# Altium schematic symbol library UCP.SchLib: 378 symbols (part 8 of 14)
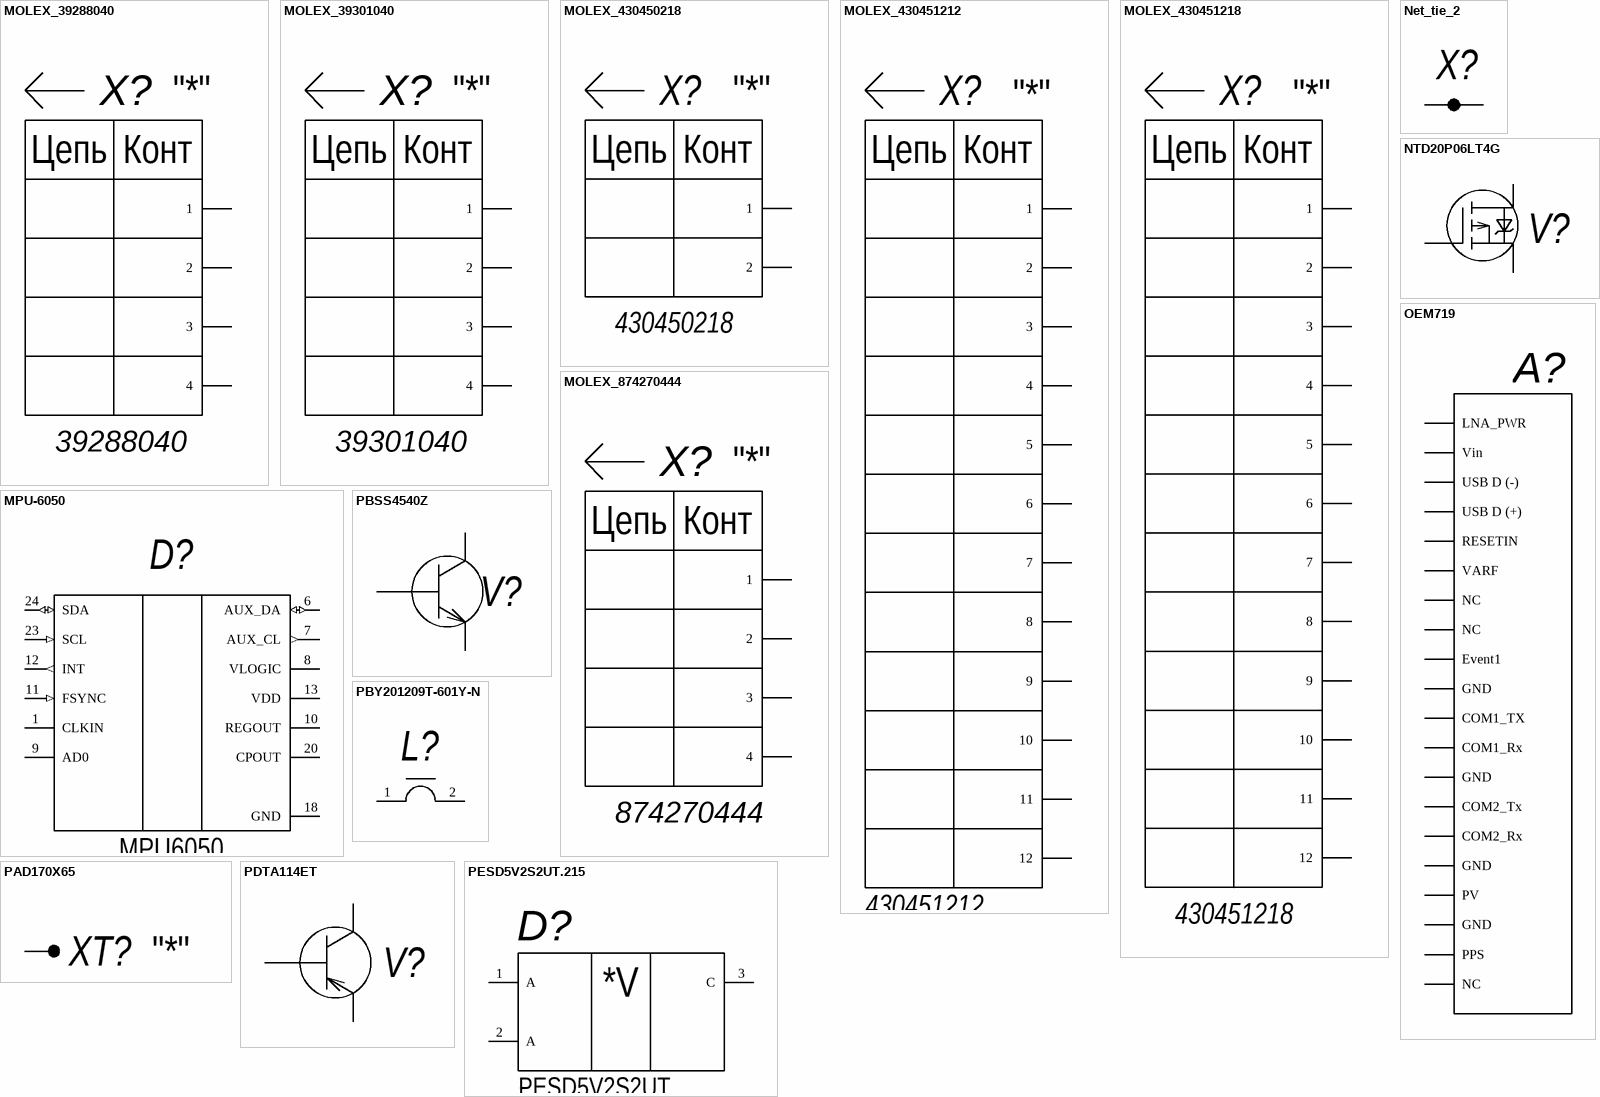
[diagram p31: symbols MOLEX_39288040 to PESD5V2S2UT.215]

## MOLEX_430451212
designator X?, comment 430451212  Marck-2: "*"
Connector Wire to Board Header 12 Position 3mm Solder Straight Thru-Hole Tray; Manufacturer 1: Molex; Manufacturer Part Number 1: 43045-1212; Marck-1: *; ComponentLink1URL: https://datasheet.ciiva.com/712/430451218-sd-712339.pdf?src-supplier=Digi-Key; ComponentLink1Description: https://datasheet.ciiva.com/712/430451218-sd-712339.pdf?src-supplier=Digi-Key; ComponentLink2URL: https://datasheet.ciiva.com/23602/1772133-23602362.pdf?src-supplier=Newark; ComponentLink2Description: https://datasheet.ciiva.com/23602/1772133-23602362.pdf?src-supplier=Newark; ComponentLink3URL: https://datasheet.ciiva.com/5154/0430451218-pcb-headers-142841-5154459.pdf?src-supplier=Mouser; ComponentLink3Description: https://datasheet.ciiva.com/5154/0430451218-pcb-headers-142841-5154459.pdf?src-supplier=Mouser; ComponentLink4URL: https://datasheet.ciiva.com/11748/0900766b80d6135b-11748082.pdf?src-supplier=RSComponents; ComponentLink4Description: https://datasheet.ciiva.com/11748/0900766b80d6135b-11748082.pdf?src-supplier=RSComponents; ComponentLink5URL: https://datasheet.ciiva.com/30073/1700430451218-pcb-headers-30073544.pdf?src-supplier=Onlinecomponents.com; ComponentLink5Description: https://datasheet.ciiva.com/30073/1700430451218-pcb-headers-30073544.pdf?src-supplier=Onlinecomponents.com; ComponentLink6URL: https://datasheet.ciiva.com/22637/1855212-22637515.pdf?src-supplier=Element14; ComponentLink6Description: https://datasheet.ciiva.com/22637/1855212-22637515.pdf?src-supplier=Element14; ComponentLink7URL: https://datasheet.ciiva.com/14155/04402320-14155180.pdf?src-supplier=Distrelec; ComponentLink7Description: https://datasheet.ciiva.com/14155/04402320-14155180.pdf?src-supplier=Distrelec; ComponentLink8URL: https://datasheet.ciiva.com/8004/1855212-8004159.pdf?src-supplier=Element14; ComponentLink8Description: https://datasheet.ciiva.com/8004/1855212-8004159.pdf?src-supplier=Element14; Case/Package: DIP-18 (+MECH-2); Type: Вилка; Value: 430451212; Supplier 1: Rs; Supplier Part Number 1: 2332927P; RoHS 1: Yes; Category: Headers and Wire Housings; Stock 1: 4410; Pricing 1: 5=541,25700, 100=415,45000, 375=369,65200, 1500=286,37100 (RUB); ComponentLink9URL: https://datasheet.ciiva.com/27050/883747-27050606.pdf?src-supplier=Jameco; ComponentLink9Description: https://datasheet.ciiva.com/27050/883747-27050606.pdf?src-supplier=Jameco; ComponentLink10URL: https://datasheet.ciiva.com/5148/0430451212-pcb-headers-168208-5148743.pdf?src-supplier=Mouser; ComponentLink10Description: https://datasheet.ciiva.com/5148/0430451212-pcb-headers-168208-5148743.pdf?src-supplier=Mouser; ComponentLink11URL: https://datasheet.ciiva.com/30238/390430451212-pcb-headers-30238066.pdf?src-supplier=Onlinecomponents.com; ComponentLink11Description: https://datasheet.ciiva.com/30238/390430451212-pcb-headers-30238066.pdf?src-supplier=Onlinecomponents.com; ComponentLink12URL: https://datasheet.ciiva.com/11747/0900766b801ddde5-11747979.pdf?src-supplier=Rs; ComponentLink12Description: https://datasheet.ciiva.com/11747/0900766b801ddde5-11747979.pdf?src-supplier=Rs; ComponentLink13URL: https://datasheet.ciiva.com/18454/70090800-18454534.pdf?src-supplier=Allied+Electronics; ComponentLink13Description: https://datasheet.ciiva.com/18454/70090800-18454534.pdf?src-supplier=Allied+Electronics; ComponentLink14URL: https://datasheet.ciiva.com/14155/04402316-14155196.pdf?src-supplier=Distrelec; ComponentLink14Description: https://datasheet.ciiva.com/14155/04402316-14155196.pdf?src-supplier=Distrelec; ComponentLink15URL: https://datasheet.ciiva.com/10084/0430451212-pcb-headers-10084092.pdf?src-supplier=Avnet; ComponentLink15Description: https://datasheet.ciiva.com/10084/0430451212-pcb-headers-10084092.pdf?src-supplier=Avnet; ComponentLink16URL: https://datasheet.ciiva.com/1443/1772031-1443556.pdf?src-supplier=Element14; ComponentLink16Description: https://datasheet.ciiva.com/1443/1772031-1443556.pdf?src-supplier=Element14
footprint MOLEX_430451212
pins: 1, 2, 3, 4, 5, 6, 7, 8, 9, 10, 11, 12
text: Цепь; Конт

## MOLEX_430451218
designator X?, comment 430451218  Marck-2: "*"
Header, 2 Row, Vertical, Solder Tab, 12 Pin, Tin Plate, SMT/Glow Wire Compatible; Manufacturer 1: Molex; Manufacturer Part Number 1: 43045-1218; Number of Contacts: 12; Contact Resistance: 10mR; Gender: Male; Max Voltage Rating (DC): 250.25kV; Connector Type: Rectangular; Current Rating: 5A; Voltage Rating: 600V; Voltage Rating (AC): 250V; Insulation Resistance: 1GR; Mating Cycles: 30; Pitch: 3mm; Row Spacing: 0.118inch; Glow Wire Compliant: Compliant; Value: 430450212; Marck-1: *; Supplier 1: Digi-Key; Supplier Part Number 1: 23-0430451218CT-ND; RoHS: Yes; Category: Headers and Wire Housings; Stock 1: 10398; Pricing 1: 1=4,04000, 10=3,55700, 100=2,82980 (USD); Mount: SMT; Contact Plating: Tin; Contact Material: Brass,Tin,CuZn; Housing Color: Black; Housing Material: Thermoplastic; Color: Black; Material: Polymer,Glass; Min Operating Temperature: -40°C; Max Operating Temperature: 105°C; Termination: Solder; Number of Rows: 2; Packaging: Tape and Reel; Orientation: Vertical; Package Quantity: 10; Contact Gender: Male; Number of Positions: 12; Series: Micro-Fit 3.0™ 43045; Contact Type: Male Pin; Number of Poles: 12; Number of Circuits: 12; Working Voltage: 250V; Fastening Type: Ramp; Voltage Rating (DC): 250V; Diameter: 3mm; Radiation Hardening: No; RoHS Compliant: Yes; Lead Free: Contains Lead; REACH SVHC: Unknown; Halogen Free: Low Halogen; Flammability Rating: UL94 V-0; ComponentLink1URL: https://datasheet.ciiva.com/712/430451218-sd-712339.pdf?src-supplier=Digi-Key; ComponentLink1Description: https://datasheet.ciiva.com/712/430451218-sd-712339.pdf?src-supplier=Digi-Key; ComponentLink2URL: https://datasheet.ciiva.com/23602/1772133-23602362.pdf?src-supplier=Newark; ComponentLink2Description: https://datasheet.ciiva.com/23602/1772133-23602362.pdf?src-supplier=Newark; ComponentLink3URL: https://datasheet.ciiva.com/5154/0430451218-pcb-headers-142841-5154459.pdf?src-supplier=Mouser; ComponentLink3Description: https://datasheet.ciiva.com/5154/0430451218-pcb-headers-142841-5154459.pdf?src-supplier=Mouser; ComponentLink4URL: https://datasheet.ciiva.com/11748/0900766b80d6135b-11748082.pdf?src-supplier=RSComponents; ComponentLink4Description: https://datasheet.ciiva.com/11748/0900766b80d6135b-11748082.pdf?src-supplier=RSComponents; ComponentLink5URL: https://datasheet.ciiva.com/30073/1700430451218-pcb-headers-30073544.pdf?src-supplier=Onlinecomponents.com; ComponentLink5Description: https://datasheet.ciiva.com/30073/1700430451218-pcb-headers-30073544.pdf?src-supplier=Onlinecomponents.com; ComponentLink6URL: https://datasheet.ciiva.com/22637/1855212-22637515.pdf?src-supplier=Element14; ComponentLink6Description: https://datasheet.ciiva.com/22637/1855212-22637515.pdf?src-supplier=Element14; ComponentLink7URL: https://datasheet.ciiva.com/14155/04402320-14155180.pdf?src-supplier=Distrelec; ComponentLink7Description: https://datasheet.ciiva.com/14155/04402320-14155180.pdf?src-supplier=Distrelec; ComponentLink8URL: https://datasheet.ciiva.com/8004/1855212-8004159.pdf?src-supplier=Element14; ComponentLink8Description: https://datasheet.ciiva.com/8004/1855212-8004159.pdf?src-supplier=Element14; Case/Package: SMD-14; Type: Вилка
footprint MOLEX_430451218
pins: 1, 2, 3, 4, 5, 6, 7, 8, 9, 10, 11, 12
text: Цепь; Конт

## MOLEX_874270444
designator X?, comment 874270444  Marck-2: "*"
Conn Power HDR 4 POS 4.2mm Solder ST Thru-Hole 4 Terminal 1 Port Mini-Fit JráTray; Manufacturer 1: Molex; Manufacturer Part Number 1: 87427-0444; Marck-1: *; ComponentLink1URL: https://datasheet.ciiva.com/7843/1596928-7843938.pdf?src-supplier=Element14; ComponentLink1Description: https://datasheet.ciiva.com/7843/1596928-7843938.pdf?src-supplier=Element14; ComponentLink2URL: https://datasheet.ciiva.com/22683/1722365-22683427.pdf?src-supplier=Element14; ComponentLink2Description: https://datasheet.ciiva.com/22683/1722365-22683427.pdf?src-supplier=Element14; ComponentLink3URL: https://datasheet.ciiva.com/30131/73420039288040-pcb-headers-30131996.pdf?src-supplier=Onlinecomponents.com; ComponentLink3Description: https://datasheet.ciiva.com/30131/73420039288040-pcb-headers-30131996.pdf?src-supplier=Onlinecomponents.com; ComponentLink4URL: https://datasheet.ciiva.com/16654/0039288040-pcb-headers-16654999.pdf?src-supplier=Avnet+Europe; ComponentLink4Description: https://datasheet.ciiva.com/16654/0039288040-pcb-headers-16654999.pdf?src-supplier=Avnet+Europe; ComponentLink5URL: https://datasheet.ciiva.com/5147/0039288040-pcb-headers-228424-5147723.pdf?src-supplier=Mouser; ComponentLink5Description: https://datasheet.ciiva.com/5147/0039288040-pcb-headers-228424-5147723.pdf?src-supplier=Mouser; ComponentLink6URL: https://datasheet.ciiva.com/11746/0900766b80d882e8-11746219.pdf?src-supplier=RSComponents; ComponentLink6Description: https://datasheet.ciiva.com/11746/0900766b80d882e8-11746219.pdf?src-supplier=RSComponents; ComponentLink7URL: https://datasheet.ciiva.com/19461/881346-19461679.pdf?src-supplier=Jameco; ComponentLink7Description: https://datasheet.ciiva.com/19461/881346-19461679.pdf?src-supplier=Jameco; ComponentLink8URL: https://datasheet.ciiva.com/26916/getdatasheetpartid-149656-26916395.pdf?src-supplier=Verical; ComponentLink8Description: https://datasheet.ciiva.com/26916/getdatasheetpartid-149656-26916395.pdf?src-supplier=Verical; Supplier 1: Farnell; Supplier Part Number 1: 2612452; RoHS 1: Yes; Category: Headers and Wire Housings; Stock 1: 316; Pricing 1: 1=0,65000, 10=0,54100, 50=0,48100, 100=0,42100, 500=0,37600, 1000=0,33100 (EUR); ComponentLink9URL: https://datasheet.ciiva.com/5148/0874270444-pcb-headers-262998-5148611.pdf?src-supplier=Mouser; ComponentLink9Description: https://datasheet.ciiva.com/5148/0874270444-pcb-headers-262998-5148611.pdf?src-supplier=Mouser; ComponentLink10URL: https://datasheet.ciiva.com/30087/0874270444-pcb-headers-30087364.pdf?src-supplier=Onlinecomponents.com; ComponentLink10Description: https://datasheet.ciiva.com/30087/0874270444-pcb-headers-30087364.pdf?src-supplier=Onlinecomponents.com; ComponentLink11URL: https://datasheet.ciiva.com/11753/0900766b80d5f08a-11753057.pdf?src-supplier=RSComponents; ComponentLink11Description: https://datasheet.ciiva.com/11753/0900766b80d5f08a-11753057.pdf?src-supplier=RSComponents; Value: 874270444; Case/Package: DIP-4; Mount: THT; Type: Вилка
footprint MOLEX_874270444 (Header, Vertical Receptacle, 4.20 mm row X 5.50 mm column pitch; 1.19 mm lead width, 4 pins, 2 rows, 2 pins per row, 9.80 mm L X 9.60 mm W X 13.05 mm H body)
pins: 1, 2, 3, 4
text: Цепь; Конт

## MPU-6050
designator D?  value MPU6050  (hidden comment: MPU-6050)
IMU ACCEL/GYRO 3-AXIS I2C 24QFN; Manufacturer 1: TDK InvenSense; Sensor Type: Accelerometer,Gyroscope,6 Axis; Type: Микросхема; Supplier 1: Farnell; Supplier Part Number 1: 1864742; Manufacturer Part Number 1: MPU-6050; RoHS 1: Yes; Category: Inertial Measurement Units (IMUs); Pricing 1: 1=11,33000, 10=9,28000, 25=8,04000, 50=7,45000 (EUR); Mount: SMT; Case/Package: QFN24; Min Operating Temperature: -40°C; Max Operating Temperature: 85°C; Packaging: Cut Tape; Output Type: I2C; Series: -; RoHS Compliant: Yes; ComponentLink1URL: https://datasheet.ciiva.com/1513/1788002-1513632.pdf?src-supplier=Element14; ComponentLink1Description: https://datasheet.ciiva.com/1513/1788002-1513632.pdf?src-supplier=Element14; ComponentLink2URL: https://datasheet.ciiva.com/22731/1788002-22731434.pdf?src-supplier=Element14; ComponentLink2Description: https://datasheet.ciiva.com/22731/1788002-22731434.pdf?src-supplier=Element14
footprint TDK_MPU6050 (Quad Flat No-Lead (QFN) with Thermal Tab, 0.50 mm pitch;  square, 6 pin X 6 pin, 4.00 mm L X 4.00 mm W X 0.95 mm H body)
pins: 1 CLKIN "Назначение вывода", 2 NC hidden "Назначение вывода", 3 NC hidden "Назначение вывода", 4 NC hidden "Назначение вывода", 5 NC hidden "Назначение вывода", 6 AUX_DA (io) "Назначение вывода", 7 AUX_CL (out) "Назначение вывода", 8 VLOGIC (power) "Назначение вывода", 9 AD0 "Назначение вывода", 10 REGOUT "Назначение вывода", 11 FSYNC (in) "Назначение вывода", 12 INT (out) "Назначение вывода", 13 VDD (power) "Назначение вывода", 14 NC hidden "Назначение вывода", 15 NC hidden "Назначение вывода", 16 NC hidden "Назначение вывода", 17 NC hidden "Назначение вывода", 18 GND (power) "Назначение вывода", 19 RESV hidden "Назначение вывода", 20 CPOUT "Назначение вывода", 21 RESV hidden "Назначение вывода", 22 RESV hidden "Назначение вывода", 23 SCL (in) "Назначение вывода", 24 SDA (io) "Назначение вывода"

## Net_tie_2
designator X?, comment Net_Tie  (value not drawn)  (net tie, no BOM)
Соединение цепей 2 контакта; Value: 0; Mount: 0; Type: 0
footprint Net_tie_2 (Connection 2 pin)
pins: 1 "Назначение вывода", 2 "Назначение вывода"

## NTD20P06LT4G
designator V?  (value not drawn)
MOSFET – Power, Single, / P-Channel, DPAK / -60 V, -15.5 A; Value: 20P06; Supplier Part Number 1: 47AC9536; Supplier 1: Newark; Case/Package: TO-252-3; Mount: SMT; Type: Транзистор
footprint DPAK4P229_990X238L159X76T520X546N (DPAK, 2.29 mm pitch; 2 pin, 6.095 mm L X 6.54 mm W X 2.38 mm H body)
pins: 1 G, 3 S, 4 D

## OEM719
designator A?  (value not drawn)
Case/Package: DIP-20; Mount: THT; Type: Модуль электронный; Value: OEM719
footprint OEM719
pins: 1 LNA_PWR "Назначение вывода", 2 Vin "Назначение вывода", 3 USB D (-) "Назначение вывода", 4 USB D (+) "Назначение вывода", 5 RESETIN "Назначение вывода", 6 VARF "Назначение вывода", 7 NC "Назначение вывода", 8 NC "Назначение вывода", 9 Event1 "Назначение вывода", 10 GND "Назначение вывода", 11 COM1_TX "Назначение вывода", 12 COM1_Rx "Назначение вывода", 13 GND "Назначение вывода", 14 COM2_Tx "Назначение вывода", 15 COM2_Rx "Назначение вывода", 16 GND "Назначение вывода", 17 PV "Назначение вывода", 18 GND "Назначение вывода", 19 PPS "Назначение вывода", 20 NC "Назначение вывода"

## PAD170X65
designator XT?  Marck-2: "*"  (no BOM)
Pad for mounting wire L=1.70 mm W=0.65 mm; Value: 0; Marck-1: *; Case/Package: SMT-1; Mount: SMT; Type: 0
footprint PAD170X65 (Pad for mounting wire L=1.70 mm W=0.65 mm)
pins: 1

## PBSS4540Z
designator V?, comment PBSS4540Z,115  (value not drawn)
40V, 5A low VCEsat NPN transistor; Manufacturer 1: Nexperia; Case/Package: SOT223; Mount: SMT; Type: Транзистор; Value: PBSS4540Z; Supplier 1: Farnell; Supplier Part Number 1: 8736383; Manufacturer Part Number 1: PBSS4540Z,115; RoHS 1: Yes; Category: BJTs; Stock 1: 3756; Pricing 1: 1=0,485, 10=0,403, 50=0,267, 200=0,24, 500=0,213 (EUR); RoHS Compliant: Yes; ComponentLink1URL: http://www.farnell.com/datasheets/723142.pdf?src-supplier=Farnell; ComponentLink1Description: http://www.farnell.com/datasheets/723142.pdf?src-supplier=Farnell
footprint SOT223-4P230_700X180L92X75N (Small Outline Transistor (SOT223), 2.30 mm pitch; 4 pin, 6.50 mm L X 3.50 mm W X 1.80 mm H body)
pins: 1 B, 2 C, 3 E, 4 C

## PBY201209T-601Y-N
designator L?  (value not drawn)
SMT EMI Suppression Ferrite Bead, size 0805, 600Ohm, 1.5A; Manufacturer Part Number: 742792041; Manufacturer: Wurth Elektronik; Impedance max.: 700Ohm; DC Resistance max.: 0.4Ohm; Type: Бусина ферритовая; Value: FB0805; ComponentLink1Description: Manufacturer; ComponentLink1URL: http://www.we-online.de; ComponentLink2Description: Datasheet; ComponentLink2URL: https://www.we-online.com/catalog/datasheet/742792041.pdf; Operating Temperature: -55 to +125degC; Packaging: Tape and Reel; Published Date: March 2020; Rated Current: 1.5A; Impedance @100MHz: 600Ohm; Mounting Technology: SMT; Size: 0805; Supplier 1: Digi-Key; Supplier 2: Digi-Key; Supplier 3: Digi-Key; Supplier Part Number 1: 732-1604-1-ND; Supplier Part Number 2: 732-1605-1-ND; Supplier Part Number 3: 732-1589-1-ND; Case/Package: 0805; Mount: SMT
footprint INDC200X125X60L35 (Inductor, Chip; 2.00 mm L X 1.25 mm W X 0.60 mm H body)
pins: 1 "Назначение вывода", 2 "Назначение вывода"

## PDTA114ET
designator V?, comment PDTA114ET,215  (value not drawn)
PNP resistor-equipped transistors. / R1 = 10k, R2 = 10k.; Supplier 1: Avnet; Supplier 2: Digi-Key; Supplier Part Number 2: 1727-5127-1-ND; Supplier Part Number 1: PDTA114ET215; Case/Package: SOT-23-3; Mount: SMT; Type: Транзистор; Value: PDTA114ET
footprint SOT23-3P95_240X110L25X60N (Small Outline Transistor (SOT23), 0.95 mm pitch; 3 pin, 2.90 mm L X 1.30 mm W X 1.10 mm H body)
footprint SOT23-3P95_240X110L30X43N (Small Outline Transistor (SOT23), 0.95 mm pitch; 3 pin, 2.90 mm L X 1.30 mm W X 1.10 mm H body)
pins: 1 B, 2 E, 3 C

## PESD5V2S2UT.215
designator D?  value PESD5V2S2UT  (hidden comment: PESD5V2S2UT.215)
Double ESD protection diodes in SOT23 package; Type: Микросхема; Case/Package: SOT-23-3; ComponentLink1URL: https://datasheet.ciiva.com/1180/48082-1180489.pdf?src-supplier=Element14; ComponentLink1Description: https://datasheet.ciiva.com/1180/48082-1180489.pdf?src-supplier=Element14; ComponentLink2URL: https://datasheet.ciiva.com/14174/qi600123-e-14174045.pdf?src-supplier=Distrelec; ComponentLink2Description: https://datasheet.ciiva.com/14174/qi600123-e-14174045.pdf?src-supplier=Distrelec; ComponentLink3URL: https://datasheet.ciiva.com/1180/23073-1180485.pdf?src-supplier=Element14; ComponentLink3Description: https://datasheet.ciiva.com/1180/23073-1180485.pdf?src-supplier=Element14; Mount: SMT; Supplier 1: Rs; Supplier Part Number 1: 1661429
footprint SOT23-3P95_240X110L30X43N (Small Outline Transistor (SOT23), 0.95 mm pitch; 3 pin, 2.90 mm L X 1.30 mm W X 1.10 mm H body)
pins: 1 A, 2 A, 3 C
text: *V

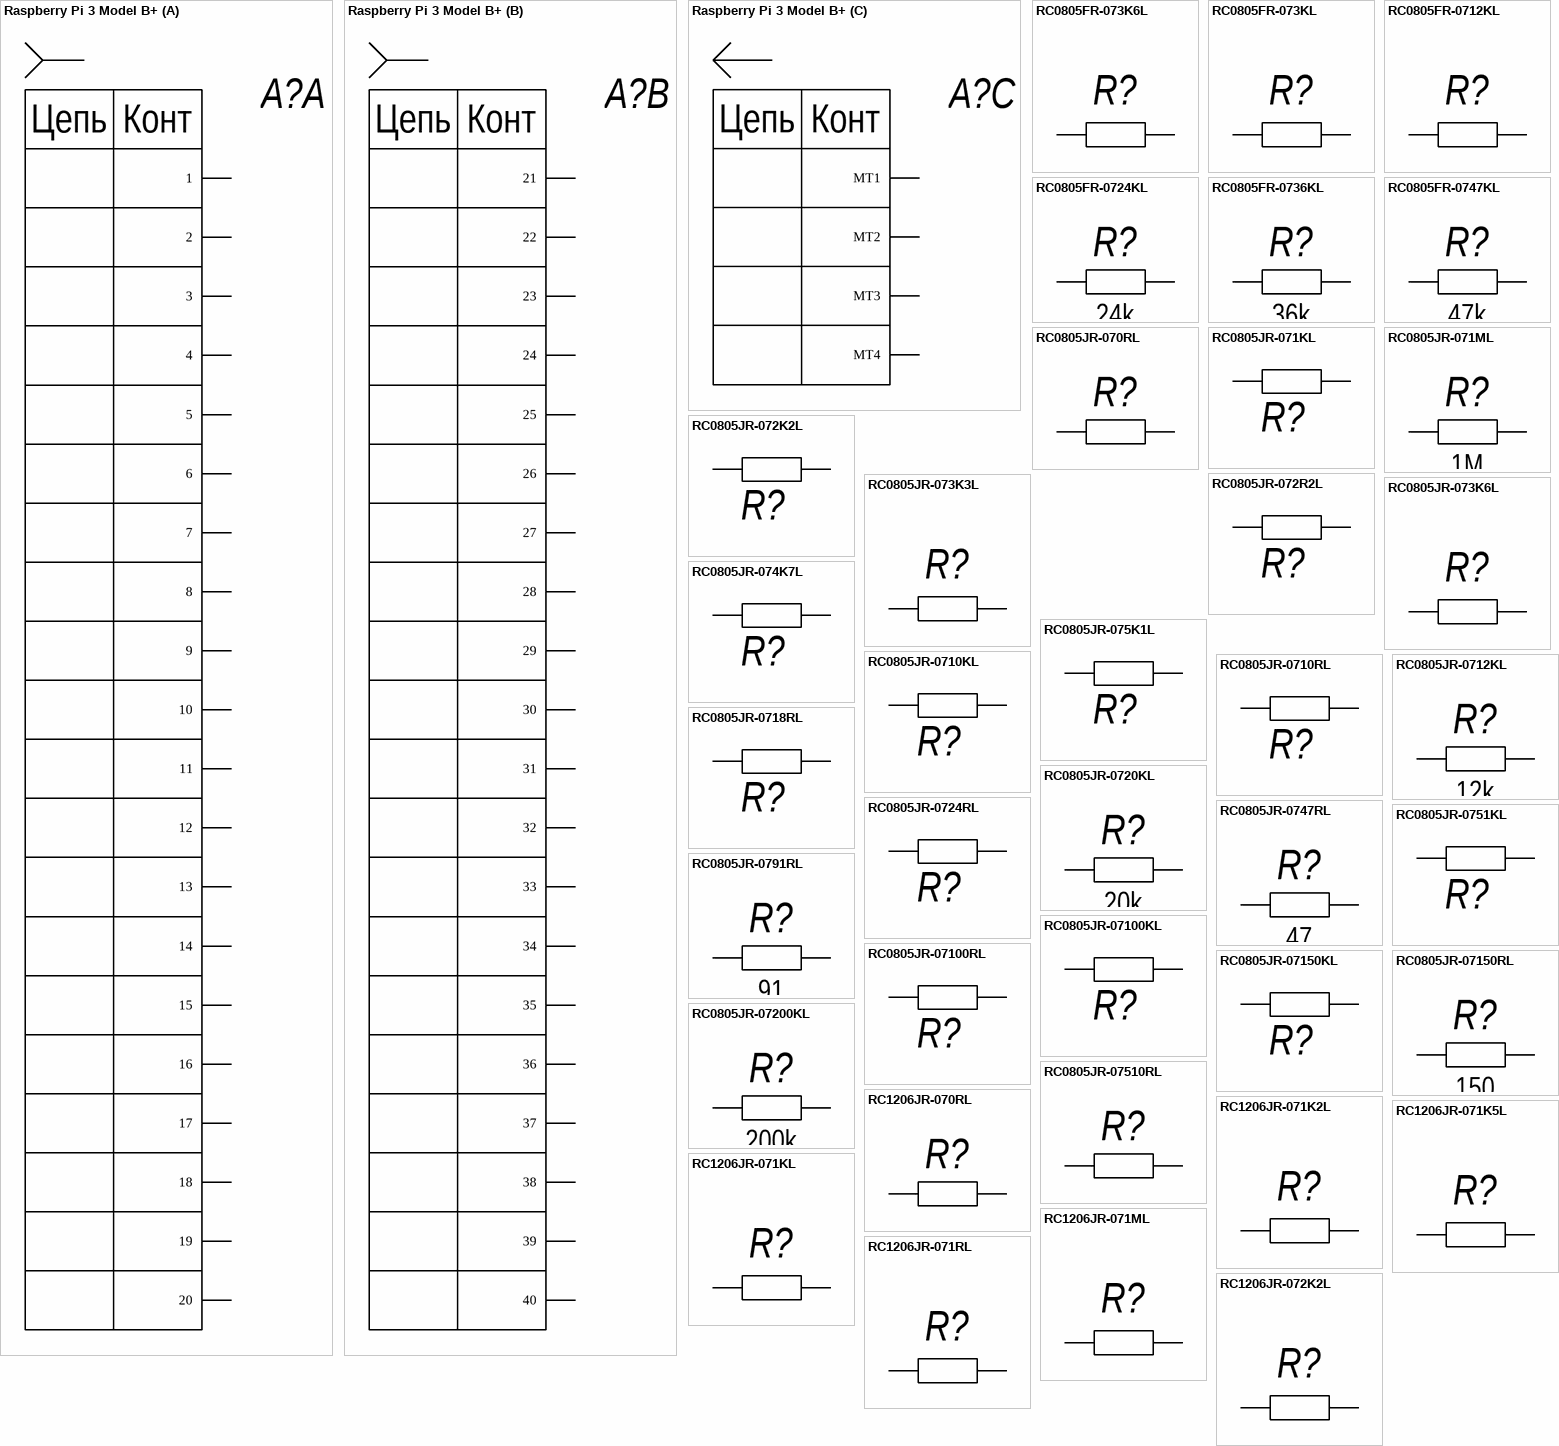
[diagram p18: symbols Raspberry Pi 3 Model B+ to RC1206JR-072K2L]

## Raspberry Pi 3 Model B+
designator A?  (value not drawn)
Single-board computer / 1.4GHz 64-bit quad-core processor, dual-band wireless LAN, Bluetooth 4.2/BLE, faster Ethernet, and Power-over-Ethernet support (with separate PoE HAT); Value: R_PI_3B+; Supplier 1: Rs; Supplier Part Number 1: 1373331
footprint RASPBERRY_PI_3_MODEL_B+
part A pins: 1, 2, 3, 4, 5, 6, 7, 8, 9, 10, 11, 12, 13, 14, 15, 16, 17, 18, 19, 20
part B pins: 21, 22, 23, 24, 25, 26, 27, 28, 29, 30, 31, 32, 33, 34, 35, 36, 37, 38, 39, 40
part C pins: MT1, MT2, MT3, MT4
part A text: Цепь; Конт
part B text: Цепь; Конт
part C text: Цепь; Конт

## RC0805FR-073K6L
designator R?  (value not drawn)
Chip Resistor Surface Mount 0805 3.6 кОм 1%; Manufacturer 1: Yageo; Resistance: 3.6kR; Voltage Rating: 200V; Value: 3k6; Case/Package: 0805; Tolerance: 1%; Resistance Tolerance: 1%; Mount: SMT; Type: Резистор; Supplier 1: Rs; Supplier Part Number 1: 2427002; Manufacturer Part Number 1: RC0805FR-073K6L; RoHS 1: Yes; Category: Chip SMD Resistors; Stock 1: 19500; Pricing 1: 100=0,008, 1000=0,006, 2000=0,005 (GBP); ComponentLink1URL: https://datasheet.ciiva.com/11819/0900766b8106beab-11819852.pdf?src-supplier=Rs; ComponentLink1Description: https://datasheet.ciiva.com/11819/0900766b8106beab-11819852.pdf?src-supplier=Rs; ComponentLink2URL: https://datasheet.ciiva.com/2509/pyu-r-int-thick-7-2509501.pdf?src-supplier=Digi-Key; ComponentLink2Description: https://datasheet.ciiva.com/2509/pyu-r-int-thick-7-2509501.pdf?src-supplier=Digi-Key; ComponentLink3URL: https://datasheet.ciiva.com/2509/pyu-r-int-thick-7-2509502.pdf?src-supplier=Digi-Key; ComponentLink3Description: https://datasheet.ciiva.com/2509/pyu-r-int-thick-7-2509502.pdf?src-supplier=Digi-Key; ComponentLink4URL: https://datasheet.ciiva.com/2509/pyu-r-int-thick-7-2509503.pdf?src-supplier=Digi-Key; ComponentLink4Description: https://datasheet.ciiva.com/2509/pyu-r-int-thick-7-2509503.pdf?src-supplier=Digi-Key; ComponentLink5URL: https://datasheet.ciiva.com/15189/getdatasheetpartid-327996-15189964.pdf?src-supplier=Verical; ComponentLink5Description: https://datasheet.ciiva.com/15189/getdatasheetpartid-327996-15189964.pdf?src-supplier=Verical; ComponentLink6URL: https://datasheet.ciiva.com/17041/rc0805-17041166.pdf?src-supplier=Future+Electronics; ComponentLink6Description: https://datasheet.ciiva.com/17041/rc0805-17041166.pdf?src-supplier=Future+Electronics
footprint RESC200X125X60L35 (Resistor, Chip; 2.00 mm L X 1.25 mm W X 0.60 mm H body)
pins: 1, 2

## RC0805FR-073KL
designator R?  (value not drawn)
Chip Resistor Surface Mount 0805 3 кОм 1%; Manufacturer 1: Yageo; Value: 3k; Case/Package: 0805; Size Code: 0805; Radiation Hardening: No; Mount: SMT; Type: Резистор; Supplier 1: Rs; Supplier Part Number 1: 1995719; Manufacturer Part Number 1: RC0805FR-073KL; RoHS 1: Yes; Category: Chip SMD Resistors; Stock 1: 800; Pricing 1: 5000=1,09, 25000=1,09, 50000=1,09, 100000=0,818, 200000=0,818 (RUB); ComponentLink1URL: https://datasheet.ciiva.com/5558/rc0805-5558124.pdf?src-supplier=Mouser; ComponentLink1Description: https://datasheet.ciiva.com/5558/rc0805-5558124.pdf?src-supplier=Mouser; ComponentLink2URL: https://datasheet.ciiva.com/17043/rc0805-17043750.pdf?src-supplier=Future+Electronics; ComponentLink2Description: https://datasheet.ciiva.com/17043/rc0805-17043750.pdf?src-supplier=Future+Electronics; ComponentLink3URL: https://datasheet.ciiva.com/2457/pyu-r-int-thick-7-2457134.pdf?src-supplier=Digi-Key; ComponentLink3Description: https://datasheet.ciiva.com/2457/pyu-r-int-thick-7-2457134.pdf?src-supplier=Digi-Key; ComponentLink4URL: https://datasheet.ciiva.com/2457/pyu-r-int-thick-7-2457135.pdf?src-supplier=Digi-Key; ComponentLink4Description: https://datasheet.ciiva.com/2457/pyu-r-int-thick-7-2457135.pdf?src-supplier=Digi-Key; ComponentLink5URL: https://datasheet.ciiva.com/2457/pyu-r-int-thick-7-2457136.pdf?src-supplier=Digi-Key; ComponentLink5Description: https://datasheet.ciiva.com/2457/pyu-r-int-thick-7-2457136.pdf?src-supplier=Digi-Key
footprint RESC200X125X60L35 (Resistor, Chip; 2.00 mm L X 1.25 mm W X 0.60 mm H body)
pins: 1, 2

## RC0805FR-0712KL
designator R?  (value not drawn)
Chip Resistor Surface Mount 0805 12 кОм 1%; Manufacturer 1: Yageo; Value: 12k; Case/Package: 0805; Size Code: 0805; Radiation Hardening: No; Mount: SMT; Type: Резистор; Supplier 1: Rs; Supplier Part Number 1: 1995653P; Manufacturer Part Number 1: RC0805FR-0712KL; RoHS 1: Yes; Category: Chip SMD Resistors; Stock 1: 7300; Pricing 1: 1000=0,008, 2500=0,007, 5000=0,005, 10000=0,004 (GBP); ComponentLink1URL: https://datasheet.ciiva.com/12577/rc0805-12577253.pdf?src-supplier=Mouser; ComponentLink1Description: https://datasheet.ciiva.com/12577/rc0805-12577253.pdf?src-supplier=Mouser; ComponentLink2URL: https://datasheet.ciiva.com/2519/pyu-r-int-thick-7-2519831.pdf?src-supplier=Digi-Key; ComponentLink2Description: https://datasheet.ciiva.com/2519/pyu-r-int-thick-7-2519831.pdf?src-supplier=Digi-Key; ComponentLink3URL: https://datasheet.ciiva.com/2519/pyu-r-int-thick-7-2519832.pdf?src-supplier=Digi-Key; ComponentLink3Description: https://datasheet.ciiva.com/2519/pyu-r-int-thick-7-2519832.pdf?src-supplier=Digi-Key; ComponentLink4URL: https://datasheet.ciiva.com/2519/pyu-r-int-thick-7-2519833.pdf?src-supplier=Digi-Key; ComponentLink4Description: https://datasheet.ciiva.com/2519/pyu-r-int-thick-7-2519833.pdf?src-supplier=Digi-Key; ComponentLink5URL: https://datasheet.ciiva.com/7941/444164-7941693.pdf?src-supplier=Element14; ComponentLink5Description: https://datasheet.ciiva.com/7941/444164-7941693.pdf?src-supplier=Element14; ComponentLink6URL: https://datasheet.ciiva.com/7941/444164-7941694.pdf?src-supplier=Element14; ComponentLink6Description: https://datasheet.ciiva.com/7941/444164-7941694.pdf?src-supplier=Element14; ComponentLink7URL: https://datasheet.ciiva.com/17018/rc0805-17018634.pdf?src-supplier=Future+Electronics; ComponentLink7Description: https://datasheet.ciiva.com/17018/rc0805-17018634.pdf?src-supplier=Future+Electronics
footprint RESC200X125X60L35 (Resistor, Chip; 2.00 mm L X 1.25 mm W X 0.60 mm H body)
pins: 1, 2

## RC0805FR-0724KL
designator R?  value 24k  (hidden comment: RC0805FR-0724KL)
Chip Resistor Surface Mount 0805 24 кОм; Tolerance: 1%; Voltage Rating: 150V; Case/Package: 0805; ComponentLink1URL: https://datasheet.ciiva.com/7983/444164-7983765.pdf?src-supplier=Element14; ComponentLink1Description: https://datasheet.ciiva.com/7983/444164-7983765.pdf?src-supplier=Element14; ComponentLink2URL: https://datasheet.ciiva.com/7941/444164-7941870.pdf?src-supplier=Element14; ComponentLink2Description: https://datasheet.ciiva.com/7941/444164-7941870.pdf?src-supplier=Element14; ComponentLink3URL: https://datasheet.ciiva.com/7941/444164-7941871.pdf?src-supplier=Element14; ComponentLink3Description: https://datasheet.ciiva.com/7941/444164-7941871.pdf?src-supplier=Element14; ComponentLink4URL: https://datasheet.ciiva.com/46395/444164-46395135.pdf?src-supplier=Element14; ComponentLink4Description: https://datasheet.ciiva.com/46395/444164-46395135.pdf?src-supplier=Element14; ComponentLink5URL: https://datasheet.ciiva.com/2456/pyu-r-int-thick-7-2456304.pdf?src-supplier=Digi-Key; ComponentLink5Description: https://datasheet.ciiva.com/2456/pyu-r-int-thick-7-2456304.pdf?src-supplier=Digi-Key; ComponentLink6URL: https://datasheet.ciiva.com/2456/pyu-r-int-thick-7-2456305.pdf?src-supplier=Digi-Key; ComponentLink6Description: https://datasheet.ciiva.com/2456/pyu-r-int-thick-7-2456305.pdf?src-supplier=Digi-Key; ComponentLink7URL: https://datasheet.ciiva.com/2456/pyu-r-int-thick-7-2456303.pdf?src-supplier=Digi-Key; ComponentLink7Description: https://datasheet.ciiva.com/2456/pyu-r-int-thick-7-2456303.pdf?src-supplier=Digi-Key; ComponentLink8URL: https://datasheet.ciiva.com/12577/rc0805-12577516.pdf?src-supplier=Mouser; ComponentLink8Description: https://datasheet.ciiva.com/12577/rc0805-12577516.pdf?src-supplier=Mouser; Mount: SMT; Type: Резистор
footprint RESC200X125X60L35 (Resistor, Chip; 2.00 mm L X 1.25 mm W X 0.60 mm H body)
pins: 1, 2

## RC0805FR-0736KL
designator R?  value 36k  (hidden comment: RC0805FR-0736KL)
Chip Resistor Surface Mount 0805 36 кОм; Manufacturer 1: Yageo; Manufacturer Part Number 1: RC0805JR-0736KL; Tolerance: 1%; Voltage Rating: 150V; Resistance: 36kR; Temperature Coefficient: 100ppm/°C; Power Rating: 125mW; Case/Package: 0805; ComponentLink1URL: https://datasheet.ciiva.com/7983/444164-7983765.pdf?src-supplier=Element14; ComponentLink1Description: https://datasheet.ciiva.com/7983/444164-7983765.pdf?src-supplier=Element14; ComponentLink2URL: https://datasheet.ciiva.com/7941/444164-7941870.pdf?src-supplier=Element14; ComponentLink2Description: https://datasheet.ciiva.com/7941/444164-7941870.pdf?src-supplier=Element14; ComponentLink3URL: https://datasheet.ciiva.com/7941/444164-7941871.pdf?src-supplier=Element14; ComponentLink3Description: https://datasheet.ciiva.com/7941/444164-7941871.pdf?src-supplier=Element14; ComponentLink4URL: https://datasheet.ciiva.com/46395/444164-46395135.pdf?src-supplier=Element14; ComponentLink4Description: https://datasheet.ciiva.com/46395/444164-46395135.pdf?src-supplier=Element14; ComponentLink5URL: https://datasheet.ciiva.com/2456/pyu-r-int-thick-7-2456304.pdf?src-supplier=Digi-Key; ComponentLink5Description: https://datasheet.ciiva.com/2456/pyu-r-int-thick-7-2456304.pdf?src-supplier=Digi-Key; ComponentLink6URL: https://datasheet.ciiva.com/2456/pyu-r-int-thick-7-2456305.pdf?src-supplier=Digi-Key; ComponentLink6Description: https://datasheet.ciiva.com/2456/pyu-r-int-thick-7-2456305.pdf?src-supplier=Digi-Key; ComponentLink7URL: https://datasheet.ciiva.com/2456/pyu-r-int-thick-7-2456303.pdf?src-supplier=Digi-Key; ComponentLink7Description: https://datasheet.ciiva.com/2456/pyu-r-int-thick-7-2456303.pdf?src-supplier=Digi-Key; ComponentLink8URL: https://datasheet.ciiva.com/12577/rc0805-12577516.pdf?src-supplier=Mouser; ComponentLink8Description: https://datasheet.ciiva.com/12577/rc0805-12577516.pdf?src-supplier=Mouser; Mount: SMT; Type: Резистор; Supplier 1: Farnell; Supplier Part Number 1: 4056818; RoHS 1: Yes; Category: Chip SMD Resistors; Pricing 1: 5000=0,00600 (EUR); Contact Plating: Tin,Matte; Case Code (Imperial): 0805; Case Code (Metric): 2012; Size Code: 0805; Min Operating Temperature: -55°C; Max Operating Temperature: 155°C; Resistor Type: Thick Film; Packaging: Tape and Reel; Package Quantity: 1; Termination: SMD/SMT; Number of Terminations: 2; Max Power Dissipation: 125mW; Voltage Rating (DC): 150V; Features: Moisture Resistant; Series: RC; Construction: Rectangular; Length: 2mm; Width: 1.25mm; Height: 0.024inch; Depth: 1.25mm; Radiation Hardening: No; Military Standard: Not; Lead Free: Lead Free; RoHS Compliant: Yes; ComponentLink9URL: https://datasheet.ciiva.com/2456/pyu-r-int-thick-7-2456126.pdf?src-supplier=Digi-Key; ComponentLink9Description: https://datasheet.ciiva.com/2456/pyu-r-int-thick-7-2456126.pdf?src-supplier=Digi-Key; ComponentLink10URL: https://datasheet.ciiva.com/2456/pyu-r-int-thick-7-2456127.pdf?src-supplier=Digi-Key; ComponentLink10Description: https://datasheet.ciiva.com/2456/pyu-r-int-thick-7-2456127.pdf?src-supplier=Digi-Key; ComponentLink11URL: https://datasheet.ciiva.com/2456/pyu-r-int-thick-7-2456125.pdf?src-supplier=Digi-Key; ComponentLink11Description: https://datasheet.ciiva.com/2456/pyu-r-int-thick-7-2456125.pdf?src-supplier=Digi-Key
footprint RESC200X125X60L35 (Resistor, Chip; 2.00 mm L X 1.25 mm W X 0.60 mm H body)
pins: 1, 2

## RC0805FR-0747KL
designator R?  value 47k  (hidden comment: RC0805FR-0747KL)
Res Thick Film 0805 47K Ohm 1% 1/8W ±100ppm/°C Molded SMD SMD Paper T/R; Manufacturer 1: Yageo; Voltage Rating (DC): 150V; Resistance: 47kR; Power Rating: 125mW; Case/Package: 0805; Max Operating Temperature: 155°C; ComponentLink1URL: https://datasheet.ciiva.com/2456/pyu-r-int-thick-7-2456280.pdf?src-supplier=Digi-Key; ComponentLink1Description: https://datasheet.ciiva.com/2456/pyu-r-int-thick-7-2456280.pdf?src-supplier=Digi-Key; ComponentLink2URL: https://datasheet.ciiva.com/2456/pyu-r-int-thick-7-2456281.pdf?src-supplier=Digi-Key; ComponentLink2Description: https://datasheet.ciiva.com/2456/pyu-r-int-thick-7-2456281.pdf?src-supplier=Digi-Key; ComponentLink3URL: https://datasheet.ciiva.com/2456/pyu-r-int-thick-7-2456279.pdf?src-supplier=Digi-Key; ComponentLink3Description: https://datasheet.ciiva.com/2456/pyu-r-int-thick-7-2456279.pdf?src-supplier=Digi-Key; ComponentLink4URL: https://datasheet.ciiva.com/15190/getdatasheetpartid-325287-15190058.pdf?src-supplier=Verical; ComponentLink4Description: https://datasheet.ciiva.com/15190/getdatasheetpartid-325287-15190058.pdf?src-supplier=Verical; Mount: SMT; Type: Резистор; Supplier 1: Farnell; Supplier Part Number 1: 9237836; Manufacturer Part Number 1: RC0805FR-0747KL; RoHS 1: Yes; Category: Chip SMD Resistors; Stock 1: 9045; Pricing 1: 10=0,04200, 100=0,01700, 500=0,01200, 1000=0,00700, 2500=0,00690 (EUR); Number of Pins: 2; Contact Plating: Tin,Matte; Case Code (Imperial): 0805; Case Code (Metric): 2012; Size Code: 0805; Min Operating Temperature: -55°C; Tolerance: 1%; Packaging: Tape and Reel; Resistor Type: Thick Film; Temperature Coefficient: 100ppm/°C; Voltage Rating: 150V; Termination: SMD/SMT; Features: Moisture Resistant; Series: RC; Max Power Dissipation: 125mW; Number of Terminations: 2; Resistance Tolerance: 1%; Length: 2mm; Width: 1.25mm; Height: 0.5mm; Depth: 1.25mm; Radiation Hardening: No; Lead Free: Lead Free; RoHS Compliant: Yes; ComponentLink5URL: https://datasheet.ciiva.com/7941/1686128-7941799.pdf?src-supplier=Element14; ComponentLink5Description: https://datasheet.ciiva.com/7941/1686128-7941799.pdf?src-supplier=Element14; ComponentLink6URL: https://datasheet.ciiva.com/46447/444164-46447581.pdf?src-supplier=Element14; ComponentLink6Description: https://datasheet.ciiva.com/46447/444164-46447581.pdf?src-supplier=Element14; ComponentLink7URL: https://datasheet.ciiva.com/7941/444164-7941800.pdf?src-supplier=Element14; ComponentLink7Description: https://datasheet.ciiva.com/7941/444164-7941800.pdf?src-supplier=Element14; ComponentLink8URL: https://datasheet.ciiva.com/7941/444164-7941801.pdf?src-supplier=Element14; ComponentLink8Description: https://datasheet.ciiva.com/7941/444164-7941801.pdf?src-supplier=Element14; ComponentLink9URL: https://datasheet.ciiva.com/16742/rc0805-16742265.pdf?src-supplier=Future+Electronics; ComponentLink9Description: https://datasheet.ciiva.com/16742/rc0805-16742265.pdf?src-supplier=Future+Electronics
footprint RESC200X125X60L35 (Resistor, Chip; 2.00 mm L X 1.25 mm W X 0.60 mm H body)
pins: 1, 2

## RC0805JR-070RL
designator R?  (value not drawn)
Chip Resistor Surface Mount 0805 0 Ом; Manufacturer 1: Yageo; Resistance: 0mR; Tolerance: 5%; Power Rating: 125mW; Voltage Rating: 150V; Temperature Coefficient: 200ppm/°C; Value: 0; Supplier 1: Digi-Key; Supplier Part Number 1: 311-0.0ARCT-ND; Manufacturer Part Number 1: RC0805JR-070RL; RoHS: Yes; Category: Chip SMD Resistors; Stock 1: 3016838; Pricing 1: 1=0,10000, 10=0,03100, 25=0,02240, 50=0,01720, 100=0,01260, 250=0,00964, 500=0,00770, 1000=0,00567 (USD); Case/Package: 0805; Number of Pins: 2; Contact Plating: Tin,Matte; Case Code (Imperial): 0805; Case Code (Metric): 2012; Size Code: 0805; Min Operating Temperature: -55°C; Max Operating Temperature: 155°C; Resistor Type: Thick Film; Packaging: Tape and Reel; Voltage Rating (DC): 150V; Termination: SMD/SMT; Features: Moisture Resistant; Series: RC; Max Power Dissipation: 125mW; Number of Terminations: 2; Construction: Rectangular; Technology: THICK FILM; Resistance Tolerance: 5%; Length: 2mm; Width: 1.25mm; Height: 0.5mm; Depth: 1.25mm; Radiation Hardening: No; RoHS Compliant: Yes; REACH SVHC: Unknown; Military Standard: Not; Lead Free: Lead Free; ComponentLink1URL: https://datasheet.ciiva.com/7941/1738694-7941861.pdf?src-supplier=Element14; ComponentLink1Description: https://datasheet.ciiva.com/7941/1738694-7941861.pdf?src-supplier=Element14; ComponentLink2URL: https://datasheet.ciiva.com/11819/0900766b8106beab-11819430.pdf?src-supplier=RSComponents; ComponentLink2Description: https://datasheet.ciiva.com/11819/0900766b8106beab-11819430.pdf?src-supplier=RSComponents; ComponentLink3URL: https://datasheet.ciiva.com/7941/1738694-7941862.pdf?src-supplier=Element14; ComponentLink3Description: https://datasheet.ciiva.com/7941/1738694-7941862.pdf?src-supplier=Element14; ComponentLink4URL: https://datasheet.ciiva.com/7941/1738694-7941863.pdf?src-supplier=Element14; ComponentLink4Description: https://datasheet.ciiva.com/7941/1738694-7941863.pdf?src-supplier=Element14; ComponentLink5URL: https://datasheet.ciiva.com/15190/getdatasheetpartid-330685-15190028.pdf?src-supplier=Verical; ComponentLink5Description: https://datasheet.ciiva.com/15190/getdatasheetpartid-330685-15190028.pdf?src-supplier=Verical; Mount: SMT; Type: Резистор
footprint RESC200X125X60L35 (Resistor, Chip; 2.00 mm L X 1.25 mm W X 0.60 mm H body)
pins: 1, 2

## RC0805JR-071KL
designator R?  (value not drawn)
Chip Resistor Surface Mount 0805 1 кОм; Manufacturer 1: Yageo; Resistance: 1kR; Tolerance: 5%; Temperature Coefficient: 100ppm/°C; Power Rating: 125mW; Voltage Rating: 150V; Value: 1k; Supplier 1: RSComponents; Supplier Part Number 1: 1995761; Manufacturer Part Number 1: RC0805JR-071KL; RoHS: Yes; Category: Chip SMD Resistors; Stock 1: 22200; Pricing 1: 5000=0,00300 (GBP); Case/Package: 0805; Contact Plating: Tin,Lead,Matte; Case Code (Imperial): 0805; Case Code (Metric): 2012; Size Code: 0805; Min Operating Temperature: -55°C; Max Operating Temperature: 155°C; Resistor Type: Thick Film; Packaging: Tape and Reel; Termination: SMD/SMT; Features: Moisture Resistant; Series: RC; Max Power Dissipation: 125mW; Number of Terminations: 2; Resistance Tolerance: 5%; Construction: Rectangular; Length: 2mm; Depth: 1.25mm; Radiation Hardening: No; REACH SVHC: Unknown; Lead Free: Lead Free; Military Standard: Not; RoHS Compliant: Yes; ComponentLink1URL: https://datasheet.ciiva.com/46395/444164-46395131.pdf?src-supplier=Element14; ComponentLink1Description: https://datasheet.ciiva.com/46395/444164-46395131.pdf?src-supplier=Element14; ComponentLink2URL: https://datasheet.ciiva.com/12667/rc0805-12667110.pdf?src-supplier=Mouser; ComponentLink2Description: https://datasheet.ciiva.com/12667/rc0805-12667110.pdf?src-supplier=Mouser; ComponentLink3URL: https://datasheet.ciiva.com/7941/442941-7941911.pdf?src-supplier=Element14; ComponentLink3Description: https://datasheet.ciiva.com/7941/442941-7941911.pdf?src-supplier=Element14; ComponentLink4URL: https://datasheet.ciiva.com/7941/442941-7941912.pdf?src-supplier=Element14; ComponentLink4Description: https://datasheet.ciiva.com/7941/442941-7941912.pdf?src-supplier=Element14; ComponentLink5URL: https://datasheet.ciiva.com/15190/getdatasheetpartid-135056-15190037.pdf?src-supplier=Verical; ComponentLink5Description: https://datasheet.ciiva.com/15190/getdatasheetpartid-135056-15190037.pdf?src-supplier=Verical; Mount: SMT; Type: Резистор
footprint RESC200X125X60L35 (Resistor, Chip; 2.00 mm L X 1.25 mm W X 0.60 mm H body)
pins: 1, 2

## RC0805JR-071ML
designator R?  value 1M  (hidden comment: RC0805JR-071ML)
Chip Resistor Surface Mount 0805 1 МОм; Manufacturer 1: Yageo; Manufacturer Part Number 1: RC0805JR-07100KL; Resistance: 100MR; Tolerance: 5%; Temperature Coefficient: 100ppm/°C; Power Rating: 125mW; Voltage Rating: 150V; RoHS: Yes; Category: Chip SMD Resistors; Stock 1: 22; Pricing 1: 1=0,05570, 10=0,03050 (USD); Case/Package: 0805; Contact Plating: Tin,Matte,Lead; Case Code (Imperial): 0805; Case Code (Metric): 2012; Size Code: 0805; Min Operating Temperature: -55°C; Max Operating Temperature: 155°C; Resistor Type: Thick Film; Packaging: Tape and Reel; Termination: SMD/SMT; Features: Moisture Resistant; Series: RC; Max Power Dissipation: 125mW; Number of Terminations: 2; Construction: Rectangular; Resistance Tolerance: 5%; Length: 2mm; Depth: 1.25mm; Radiation Hardening: No; REACH SVHC: Unknown; Lead Free: Lead Free; Military Standard: Not; RoHS Compliant: Yes; ComponentLink1URL: https://datasheet.ciiva.com/7941/442941-7941865.pdf?src-supplier=Element14; ComponentLink1Description: https://datasheet.ciiva.com/7941/442941-7941865.pdf?src-supplier=Element14; ComponentLink2URL: https://datasheet.ciiva.com/7941/442941-7941864.pdf?src-supplier=Element14; ComponentLink2Description: https://datasheet.ciiva.com/7941/442941-7941864.pdf?src-supplier=Element14; ComponentLink3URL: https://datasheet.ciiva.com/15190/getdatasheetpartid-479267-15190029.pdf?src-supplier=Verical; ComponentLink3Description: https://datasheet.ciiva.com/15190/getdatasheetpartid-479267-15190029.pdf?src-supplier=Verical; Manufacturer 2: Yageo; Manufacturer Part Number 2: RC0805JR-07200KL; RoHS 2: Yes; Stock 2: 19240; Pricing 2: 10=0,02900, 100=0,01200, 500=0,01100, 1000=0,00600, 2500=0,00500, 5000=0,00400, 25000=0,00390 (EUR); Package Quantity: 1; Voltage Rating (DC): 150V; Working Voltage: 150V; Technology: THICK FILM; Width: 0.049inch; Height: 0.024inch; ComponentLink4URL: https://datasheet.ciiva.com/2508/pyu-r-int-thick-7-2508736.pdf?src-supplier=Digi-Key; ComponentLink4Description: https://datasheet.ciiva.com/2508/pyu-r-int-thick-7-2508736.pdf?src-supplier=Digi-Key; ComponentLink5URL: https://datasheet.ciiva.com/2508/pyu-r-int-thick-7-2508737.pdf?src-supplier=Digi-Key; ComponentLink5Description: https://datasheet.ciiva.com/2508/pyu-r-int-thick-7-2508737.pdf?src-supplier=Digi-Key; ComponentLink6URL: https://datasheet.ciiva.com/2508/pyu-r-int-thick-7-2508735.pdf?src-supplier=Digi-Key; ComponentLink6Description: https://datasheet.ciiva.com/2508/pyu-r-int-thick-7-2508735.pdf?src-supplier=Digi-Key; ComponentLink7URL: https://datasheet.ciiva.com/16741/rc0805-16741414.pdf?src-supplier=Future+Electronics; ComponentLink7Description: https://datasheet.ciiva.com/16741/rc0805-16741414.pdf?src-supplier=Future+Electronics; Mount: SMT; Type: Резистор; Supplier 1: Rs; Supplier Part Number 1: 2427076P
footprint RESC200X125X60L35 (Resistor, Chip; 2.00 mm L X 1.25 mm W X 0.60 mm H body)
pins: 1, 2

## RC0805JR-072K2L
designator R?  (value not drawn)
Chip Resistor Surface Mount 0805 2,2 кОм; Manufacturer 1: Yageo; Resistance: 2.2kR; Tolerance: 5%; Temperature Coefficient: 100ppm/°C; Power Rating: 125mW; Voltage Rating: 150V; Value: 2k2; Supplier 1: Arrow Electronics; Supplier Part Number 1: RC0805JR-072K2L; Manufacturer Part Number 1: RC0805JR-072K2L; RoHS: Yes; Category: Chip SMD Resistors; Stock 1: 135000; Pricing 1: 5000=0,00590, 10000=0,00350 (USD); Case/Package: 0805; Contact Plating: Tin,Lead,Matte; Case Code (Imperial): 0805; Case Code (Metric): 2012; Size Code: 0805; Min Operating Temperature: -55°C; Max Operating Temperature: 155°C; Resistor Type: Thick Film; Packaging: Tape and Reel; Termination: SMD/SMT; Features: Moisture Resistant; Series: RC; Max Power Dissipation: 125mW; Number of Terminations: 2; Construction: Rectangular; Resistance Tolerance: 5%; Length: 2mm; Depth: 1.25mm; Radiation Hardening: No; REACH SVHC: Unknown; Lead Free: Lead Free; RoHS Compliant: Yes; Military Standard: Not; ComponentLink1URL: https://datasheet.ciiva.com/12667/rc0805-12667397.pdf?src-supplier=Mouser; ComponentLink1Description: https://datasheet.ciiva.com/12667/rc0805-12667397.pdf?src-supplier=Mouser; ComponentLink2URL: https://datasheet.ciiva.com/7941/442941-7941935.pdf?src-supplier=Element14; ComponentLink2Description: https://datasheet.ciiva.com/7941/442941-7941935.pdf?src-supplier=Element14; ComponentLink3URL: https://datasheet.ciiva.com/15190/getdatasheetpartid-251869-15190044.pdf?src-supplier=Verical; ComponentLink3Description: https://datasheet.ciiva.com/15190/getdatasheetpartid-251869-15190044.pdf?src-supplier=Verical; Mount: SMT; Type: Резистор
footprint RESC200X125X60L35 (Resistor, Chip; 2.00 mm L X 1.25 mm W X 0.60 mm H body)
pins: 1, 2

## RC0805JR-072R2L
designator R?  (value not drawn)
Chip Resistor Surface Mount 0805 2,2 Ом; Manufacturer 1: Yageo; Manufacturer Part Number 1: RC0805JR-072K2L; Resistance: 2.2kR; Tolerance: 5%; Temperature Coefficient: 100ppm/°C; Power Rating: 125mW; Voltage Rating: 150V; Value: 2,2; Supplier 1: Arrow Electronics; Supplier Part Number 1: RC0805JR-072K2L; RoHS: Yes; Category: Chip SMD Resistors; Stock 1: 135000; Pricing 1: 5000=0,00590, 10000=0,00350 (USD); Case/Package: 0805; Contact Plating: Tin,Lead,Matte; Case Code (Imperial): 0805; Case Code (Metric): 2012; Size Code: 0805; Min Operating Temperature: -55°C; Max Operating Temperature: 155°C; Resistor Type: Thick Film; Packaging: Tape and Reel; Termination: SMD/SMT; Features: Moisture Resistant; Series: RC; Max Power Dissipation: 125mW; Number of Terminations: 2; Construction: Rectangular; Resistance Tolerance: 5%; Length: 2mm; Depth: 1.25mm; Radiation Hardening: No; REACH SVHC: Unknown; Lead Free: Lead Free; RoHS Compliant: Yes; Military Standard: Not; ComponentLink1URL: https://datasheet.ciiva.com/12667/rc0805-12667397.pdf?src-supplier=Mouser; ComponentLink1Description: https://datasheet.ciiva.com/12667/rc0805-12667397.pdf?src-supplier=Mouser; ComponentLink2URL: https://datasheet.ciiva.com/7941/442941-7941935.pdf?src-supplier=Element14; ComponentLink2Description: https://datasheet.ciiva.com/7941/442941-7941935.pdf?src-supplier=Element14; ComponentLink3URL: https://datasheet.ciiva.com/15190/getdatasheetpartid-251869-15190044.pdf?src-supplier=Verical; ComponentLink3Description: https://datasheet.ciiva.com/15190/getdatasheetpartid-251869-15190044.pdf?src-supplier=Verical; Supplier 2: Arrow Electronics; Supplier Part Number 2: RC0805JR-072R2L; Manufacturer 2: Yageo; Manufacturer Part Number 2: RC0805JR-072R2L; RoHS 2: Yes; Stock 2: 9708; Pricing 2: 1=0,07800, 10=0,05670, 25=0,05650, 100=0,02470, 250=0,02450, 500=0,02420, 1000=0,01450, 3000=0,00600 (USD); Number of Pins: 2; Package Quantity: 1; Voltage Rating (DC): 150V; Width: 0.049inch; Height: 0.024inch; ComponentLink4URL: https://datasheet.ciiva.com/2456/pyu-r-int-thick-7-2456108.pdf?src-supplier=Digi-Key; ComponentLink4Description: https://datasheet.ciiva.com/2456/pyu-r-int-thick-7-2456108.pdf?src-supplier=Digi-Key; ComponentLink5URL: https://datasheet.ciiva.com/2456/pyu-r-int-thick-7-2456109.pdf?src-supplier=Digi-Key; ComponentLink5Description: https://datasheet.ciiva.com/2456/pyu-r-int-thick-7-2456109.pdf?src-supplier=Digi-Key; ComponentLink6URL: https://datasheet.ciiva.com/2456/pyu-r-int-thick-7-2456107.pdf?src-supplier=Digi-Key; ComponentLink6Description: https://datasheet.ciiva.com/2456/pyu-r-int-thick-7-2456107.pdf?src-supplier=Digi-Key; Mount: SMT; Type: Резистор
footprint RESC200X125X60L35 (Resistor, Chip; 2.00 mm L X 1.25 mm W X 0.60 mm H body)
pins: 1, 2

## RC0805JR-073K3L
designator R?  (value not drawn)
Chip Resistor Surface Mount 0805 3.3 кОм; Manufacturer 1: Yageo; Manufacturer Part Number 1: RC1206JR-073K3L; Description 1: Res Thick Film 1206 3.3K Ohm 5% 0.25W(1/4W) ±100ppm/°C Pad SMD T/R; Resistance: 3.3kR; Tolerance: 5%; Power Rating: 250mW; Voltage Rating: 200V; Temperature Coefficient: 100ppm/°C; Value: 3k3; Supplier 1: Digi-Key; Supplier Part Number 1: 311-3.3KERCT-ND; RoHS: Yes; Category: Chip SMD Resistors; Stock 1: 342635; Pricing 1: 1=0,10000, 10=0,06300, 100=0,02580, 1000=0,01158, 2500=0,01005 (USD); Case/Package: 0805; Case Code (Imperial): 1206; Case Code (Metric): 3216; Min Operating Temperature: -55°C; Max Operating Temperature: 155°C; Resistor Type: Thick Film; Package Quantity: 1; Packaging: Tape and Reel; Termination: SMD/SMT; Number of Terminations: 2; Max Power Dissipation: 250mW; Working Voltage: 200V; Features: Moisture Resistant; Series: RC; Resistance Tolerance: 5%; Technology: THICK FILM; Construction: Rectangular; Length: 0.122inch; Width: 0.063inch; Height: 0.026inch; Depth: 1.6mm; RoHS Compliant: Yes; REACH SVHC: Unknown; Military Standard: Not; Lead Free: Lead Free; ComponentLink1URL: https://datasheet.ciiva.com/29181/402605-da-01-en-smd-widerstand-chip1206-3-3-kohm-29181477.pdf?src-supplier=Conrad; ComponentLink1Description: https://datasheet.ciiva.com/29181/402605-da-01-en-smd-widerstand-chip1206-3-3-kohm-29181477.pdf?src-supplier=Conrad; ComponentLink2URL: https://datasheet.ciiva.com/2458/pyu-r-int-thick-7-2458662.pdf?src-supplier=Digi-Key; ComponentLink2Description: https://datasheet.ciiva.com/2458/pyu-r-int-thick-7-2458662.pdf?src-supplier=Digi-Key; ComponentLink3URL: https://datasheet.ciiva.com/2458/pyu-r-int-thick-7-2458663.pdf?src-supplier=Digi-Key; ComponentLink3Description: https://datasheet.ciiva.com/2458/pyu-r-int-thick-7-2458663.pdf?src-supplier=Digi-Key; ComponentLink4URL: https://datasheet.ciiva.com/2458/pyu-r-int-thick-7-2458664.pdf?src-supplier=Digi-Key; ComponentLink4Description: https://datasheet.ciiva.com/2458/pyu-r-int-thick-7-2458664.pdf?src-supplier=Digi-Key; ComponentLink5URL: https://datasheet.ciiva.com/7857/444357-7857499.pdf?src-supplier=Element14; ComponentLink5Description: https://datasheet.ciiva.com/7857/444357-7857499.pdf?src-supplier=Element14; ComponentLink6URL: https://datasheet.ciiva.com/7857/444357-7857500.pdf?src-supplier=Element14; ComponentLink6Description: https://datasheet.ciiva.com/7857/444357-7857500.pdf?src-supplier=Element14; Supplier 2: Farnell; Supplier Part Number 2: 9234071; Manufacturer 2: Yageo; Manufacturer Part Number 2: RC0805JR-073K3L; RoHS 2: Yes; Pricing 2: 10=0,03600, 100=0,01500, 500=0,01100, 1000=0,00700, 2500=0,00600 (EUR); Contact Plating: Tin,Lead; Size Code: 0805; Radiation Hardening: No; ComponentLink7URL: https://datasheet.ciiva.com/46395/444164-46395133.pdf?src-supplier=Element14; ComponentLink7Description: https://datasheet.ciiva.com/46395/444164-46395133.pdf?src-supplier=Element14; ComponentLink8URL: https://datasheet.ciiva.com/12667/rc0805-12667382.pdf?src-supplier=Mouser; ComponentLink8Description: https://datasheet.ciiva.com/12667/rc0805-12667382.pdf?src-supplier=Mouser; ComponentLink9URL: https://datasheet.ciiva.com/7941/442941-7941960.pdf?src-supplier=Element14; ComponentLink9Description: https://datasheet.ciiva.com/7941/442941-7941960.pdf?src-supplier=Element14; ComponentLink10URL: https://datasheet.ciiva.com/7941/442941-7941959.pdf?src-supplier=Element14; ComponentLink10Description: https://datasheet.ciiva.com/7941/442941-7941959.pdf?src-supplier=Element14; ComponentLink11URL: https://datasheet.ciiva.com/16944/rc0805-16944442.pdf?src-supplier=Future+Electronics; ComponentLink11Description: https://datasheet.ciiva.com/16944/rc0805-16944442.pdf?src-supplier=Future+Electronics; Mount: SMT; Type: Резистор
footprint RESC200X125X60L35 (Resistor, Chip; 2.00 mm L X 1.25 mm W X 0.60 mm H body)
pins: 1, 2